# Altium footprint library C2835315.PcbLib: 1 footprints
Each footprint in its own frame and in the unit in brackets; x right, y up, seen from the top. Pads: shape width x height; smd on the part's side, far side on the other; paste and mask are expansions set on the pad; w line width, h text height; cw(c..) or ccw(c..) is an arc to the next point about the centre after c.
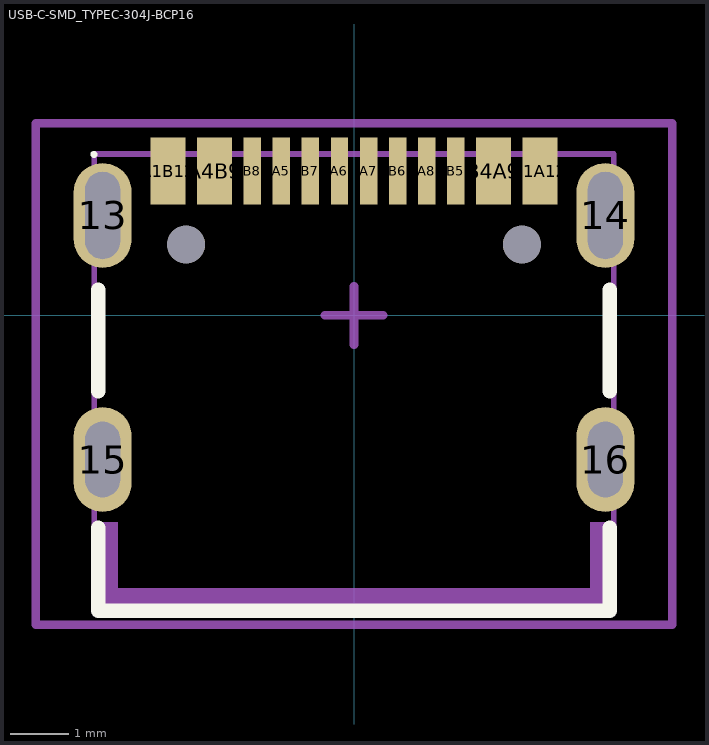
[diagram p0: the footprint, top view; thin cyan lines are the x and y axes]

## USB-C-SMD_TYPEC-304J-BCP16 [mm] "USB-C (USB TYPE-C) Receptacle Connector 16 Position Surface Mount, Right Angle"
pads (18):
  rrect100% 1x1.8 hole 0.6 slot 1.5 at 90 deg: 13(-4.325,1.719) 14(4.325,1.719)
  rrect100% 1x1.8 hole 0.6 slot 1.3 at 90 deg: 15(-4.325,-2.481) 16(4.325,-2.481)
  rect 0.6x1.15 smd: A1B12(-3.2,2.481) A4B9(-2.4,2.481) B1A12(3.2,2.481) B4A9(2.4,2.481)
  rect 0.3x1.15 smd: A5(-1.25,2.481) A6(-0.25,2.481) A7(0.25,2.481) A8(1.25,2.481) B5(1.75,2.481) B6(0.75,2.481) B7(-0.75,2.481) B8(-1.75,2.481)
  round 0.65 hole 0.65 unplated: ""(-2.89,1.219) ""(2.89,1.219)
Top Overlay:
  circle w0.06: c-4.475,2.769 r0.03
  lines w0.254: -4.4,-3.659 -4.4,-5.081 4.4,-5.081 4.4,-3.659 ; -4.4,-1.304 -4.4,0.441 ; 4.4,-1.304 4.4,0.441
Top Paste:
  drawing of 16 lines, arcs and shapes, not listed
AOI:
  circle w0.3: c2.89,1.219 r0.15
  circle w0.3: c-2.89,1.219 r0.15
  region: -4.445,-3.556 -4.445,-5.08 4.445,-5.08 4.445,-3.556 4.064,-3.556 4.064,-4.699 -4.064,-4.699 -4.064,-3.556
  region: -1.85,2.769 -1.65,2.769 -1.65,2.169 -1.85,2.169
  region: -1.35,2.769 -1.15,2.769 -1.15,2.169 -1.35,2.169
  region: -0.85,2.769 -0.65,2.769 -0.65,2.169 -0.85,2.169
  region: -0.35,2.769 -0.15,2.769 -0.15,2.169 -0.35,2.169
  region: 0.15,2.769 0.35,2.769 0.35,2.169 0.15,2.169
  region: 0.65,2.769 0.85,2.769 0.85,2.169 0.65,2.169
  region: 1.15,2.769 1.35,2.769 1.35,2.169 1.15,2.169
  region: 1.65,2.769 1.85,2.769 1.85,2.169 1.65,2.169
  region: 3,2.769 3.4,2.769 3.4,2.169 3,2.169
  region: 2.2,2.769 2.6,2.769 2.6,2.169 2.2,2.169
  region: -2.6,2.769 -2.2,2.769 -2.2,2.169 -2.6,2.169
  region: -3.4,2.769 -3,2.769 -3,2.169 -3.4,2.169
  region: 4.175,2.269 4.475,2.269 4.475,1.169 4.175,1.169
  region: -4.475,2.269 -4.175,2.269 -4.175,1.169 -4.475,1.169
  region: 4.175,-2.081 4.475,-2.081 4.475,-2.881 4.175,-2.881
  region: -4.475,-2.081 -4.175,-2.081 -4.175,-2.881 -4.475,-2.881
Top 3D Body:
  lines w0.1: -4.47,-5.075 4.47,-5.075 4.47,2.775 -4.47,2.775 -4.47,-5.075
Top Courtyard:
  lines w0.15: -0.5,0 0.5,0 ; 0,-0.5 0,0.5 ; -5.475,-5.325 5.475,-5.325 5.475,3.306 -5.475,3.306 -5.475,-5.325
3D body "USB-C-SMD_TYPEC-304J-BCP16.step": height 2, standoff 0, extent -4.47,-5.075 4.47,2.775